# EAGLE library part ESP32_DEVKITC_38 (library esp32_devkitc_38)
ESP32 DevKitC, 38 pins (clone). ESP32 development board: ESP-WROOM-32 module, CP2102 USB-to-serial, micro-USB, 3.3 V regulator, RST and BOOT buttons. Pin order equal to Espressif's ESP32-DevKitC V4. Store location: kit.
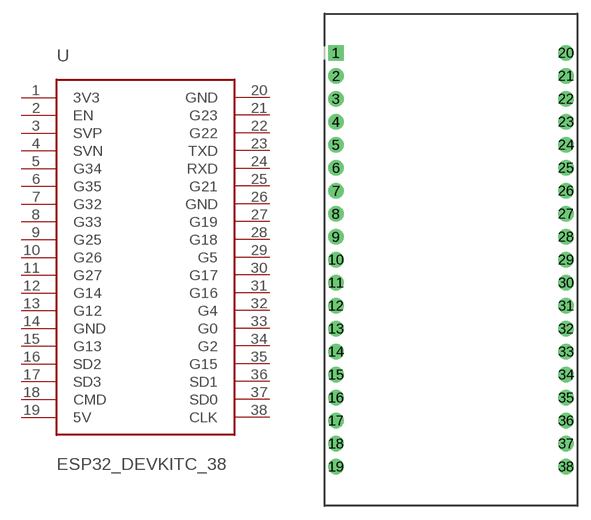
[diagram p0: symbol with the pads of ESP32_DEVKITC_38; footprint ESP32_DEVKITC_38]

Designator prefix U

## ESP32_DEVKITC_38 (LOCATION: kit)  [ESP32_DEVKITC_38]
1  3V3  pas
2  EN  in
3  SVP  in
4  SVN  in
5  G34  in
6  G35  in
7  G32
8  G33
9  G25
10  G26
11  G27
12  G14
13  G12
14  GND  pwr
15  G13
16  SD2  nc
17  SD3  nc
18  CMD  nc
19  5V  pas
20  GND  pwr
21  G23
22  G22
23  TXD
24  RXD
25  G21
26  GND  pwr
27  G19
28  G18
29  G5
30  G17
31  G16
32  G4
33  G0
34  G2
35  G15
36  SD1  nc
37  SD0  nc
38  CLK  nc

## Footprint ESP32_DEVKITC_38 (pad centres in mm)
drill 1.0 mm for 0.64 mm square header pins (diagonal 0.9 mm), pad 1.7 mm: the common 2.54 mm header land; the body outline is drawn centred on the pins
drill 1 pad 1.7 square: 1 -12.7,22.86
drill 1 pad 1.7: 2 -12.7,20.32; 3 -12.7,17.78; 4 -12.7,15.24; 5 -12.7,12.7; 6 -12.7,10.16; 7 -12.7,7.62; 8 -12.7,5.08; 9 -12.7,2.54; 10 -12.7,0; 11 -12.7,-2.54; 12 -12.7,-5.08; 13 -12.7,-7.62; 14 -12.7,-10.16; 15 -12.7,-12.7; 16 -12.7,-15.24; 17 -12.7,-17.78; 18 -12.7,-20.32; 19 -12.7,-22.86; 20 12.7,22.86; 21 12.7,20.32; 22 12.7,17.78; 23 12.7,15.24; 24 12.7,12.7; 25 12.7,10.16; 26 12.7,7.62; 27 12.7,5.08; 28 12.7,2.54; 29 12.7,0; 30 12.7,-2.54; 31 12.7,-5.08; 32 12.7,-7.62; 33 12.7,-10.16; 34 12.7,-12.7; 35 12.7,-15.24; 36 12.7,-17.78; 37 12.7,-20.32; 38 12.7,-22.86